# Altium schematic symbol library Clema_CONN.SchLib: 4 symbols
Pins are listed as number, name and electrical type; pins without a type are passive.

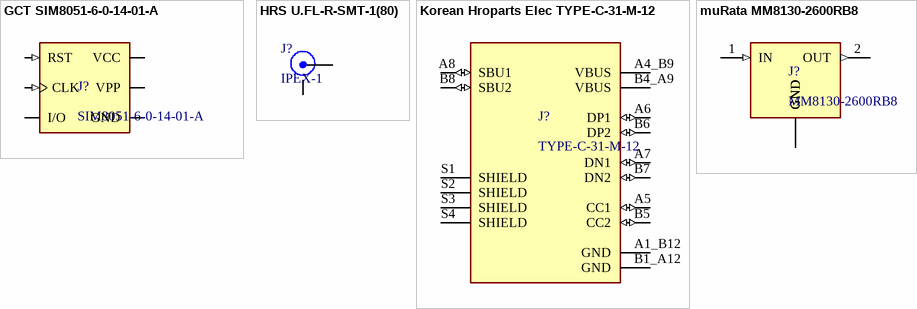
[diagram p0: symbols GCT SIM8051-6-0-14-01-A to muRata MM8130-2600RB8]

## GCT SIM8051-6-0-14-01-A
designator J?, comment SIM8051-6-0-14-01-A
Nano SIM Card Connector, Push-Pull Type, 6 Pin, SMT; Manufacturer: Global Connector Technology; Manufacturer Part Number: SIM8051-6-0-14-01-A; DigiKey Part Number: 2073-SIM8051-6-0-14-01-ATR-ND; LCSC Part Number: C3033025; Mouser Part Number: 640-SIM8051601401A; Type: SMD
footprint SIM8051-6-0-14-01-A
pins: C1 VCC (power), C2 RST (in), C3 CLK (in), C5 GND (power), C6 VPP (power), C7 I/O (io)

## HRS U.FL-R-SMT-1(80)
designator J?, comment IPEX-1
CONN RCPT IPEX 50Ω SMD; Manufacturer: HRS; Manufacturer Part Number: U.FL-R-SMT-1(80); LCSC Part Number: C88374; Type: SMD
footprint IPEX_20279-001E-03
pins: 1 SIGNAL, 2 GROUND, 3 GROUND

## Korean Hroparts Elec TYPE-C-31-M-12
designator J?, comment TYPE-C-31-M-12
CONN RCPT Type-C 16POS SMD; Manufacturer: Korean Hroparts Elec; Manufacturer Part Number: TYPE-C-31-M-12; LCSC Part Number: C165948; Type: SMD
footprint HRO_TYPE-C-31-M-12
pins: A1_B12 GND (power), A4_B9 VBUS (power), A5 CC1 (io), A6 DP1 (io), A7 DN1 (io), A8 SBU1 (io), B1_A12 GND (power), B4_A9 VBUS (power), B5 CC2 (io), B6 DP2 (io), B7 DN2 (io), B8 SBU2 (io), S1 SHIELD, S2 SHIELD, S3 SHIELD, S4 SHIELD

## muRata MM8130-2600RB8
designator J?, comment MM8130-2600RB8
CONN RCPT 50Ω SMD; Manufacturer: muRata; Manufacturer Part Number: MM8130-2600RB8; DigiKey Part Number: 490-8450-2-ND; LCSC Part Number: C91633; Mouser Part Number: 81-MM8130-2600RB8; Type: SMD
footprint MURATA_MM8130-2600RA2
pins: 1 IN (in), 2 OUT (out), G1 GND (power), G2 GND (power), G3 GND (power), G4 GND (power)